# Altium schematic symbol library MCP73831T-2ACIOT.SchLib: 1 symbol
Pins are listed as number, name and electrical type; pins without a type are passive.

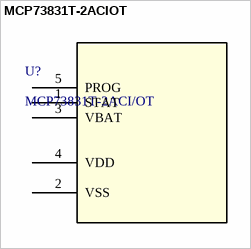
[diagram p0: symbol MCP73831T-2ACIOT]

## MCP73831T-2ACIOT
designator U?, comment MCP73831T-2ACI/OT
Description; Manufacturer_Name: Microchip; Copyright: Copyright (C) 2026 Ultra Librarian. All rights reserved.; Manufacturer_Part_Number: MCP73831T-2ACI/OT; RefDes: RefDes; Type: Type
footprint SOT-23-5_MC_MCH
pins: 1 STAT, 2 VSS, 3 VBAT, 4 VDD, 5 PROG